# Altium schematic symbol library FM25V05-G.SchLib: 1 symbol
Pins are listed as number, name and electrical type; pins without a type are passive.

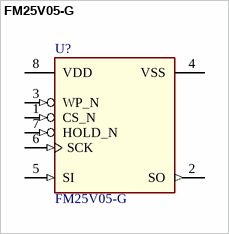
[diagram p0: symbol FM25V05-G]

## FM25V05-G
designator U?
4-Kbit (512 × 8) Serial (SPI) F-RAM; Manufacturer: Infineon Technologies; PackageReference: PG-DSO-8-802; Manufacturer Order Number: FM25V05-G
pins: 1 CS_N (in) "Chip Select", 2 SO (out) "Serial Output", 3 WP_N (in) "Write Protect", 4 VSS (power) "Ground for the device. Must be connected to the ground of the system", 5 SI (in) "Serial Input", 6 SCK (in) "Serial Clock", 7 HOLD_N (in) "The HOLD pin is used when the host CPU must interrupt a memory operation for another  task.", 8 VDD (power) "Power supply input to the device."